# Altium footprint library Footprint.PcbLib: 154 footprints (part 5 of 10)
Each footprint in its own frame and in the unit in brackets; x right, y up, seen from the top. Pads: shape width x height; smd on the part's side, far side on the other; paste and mask are expansions set on the pad; w line width, h text height; cw(c..) or ccw(c..) is an arc to the next point about the centre after c.
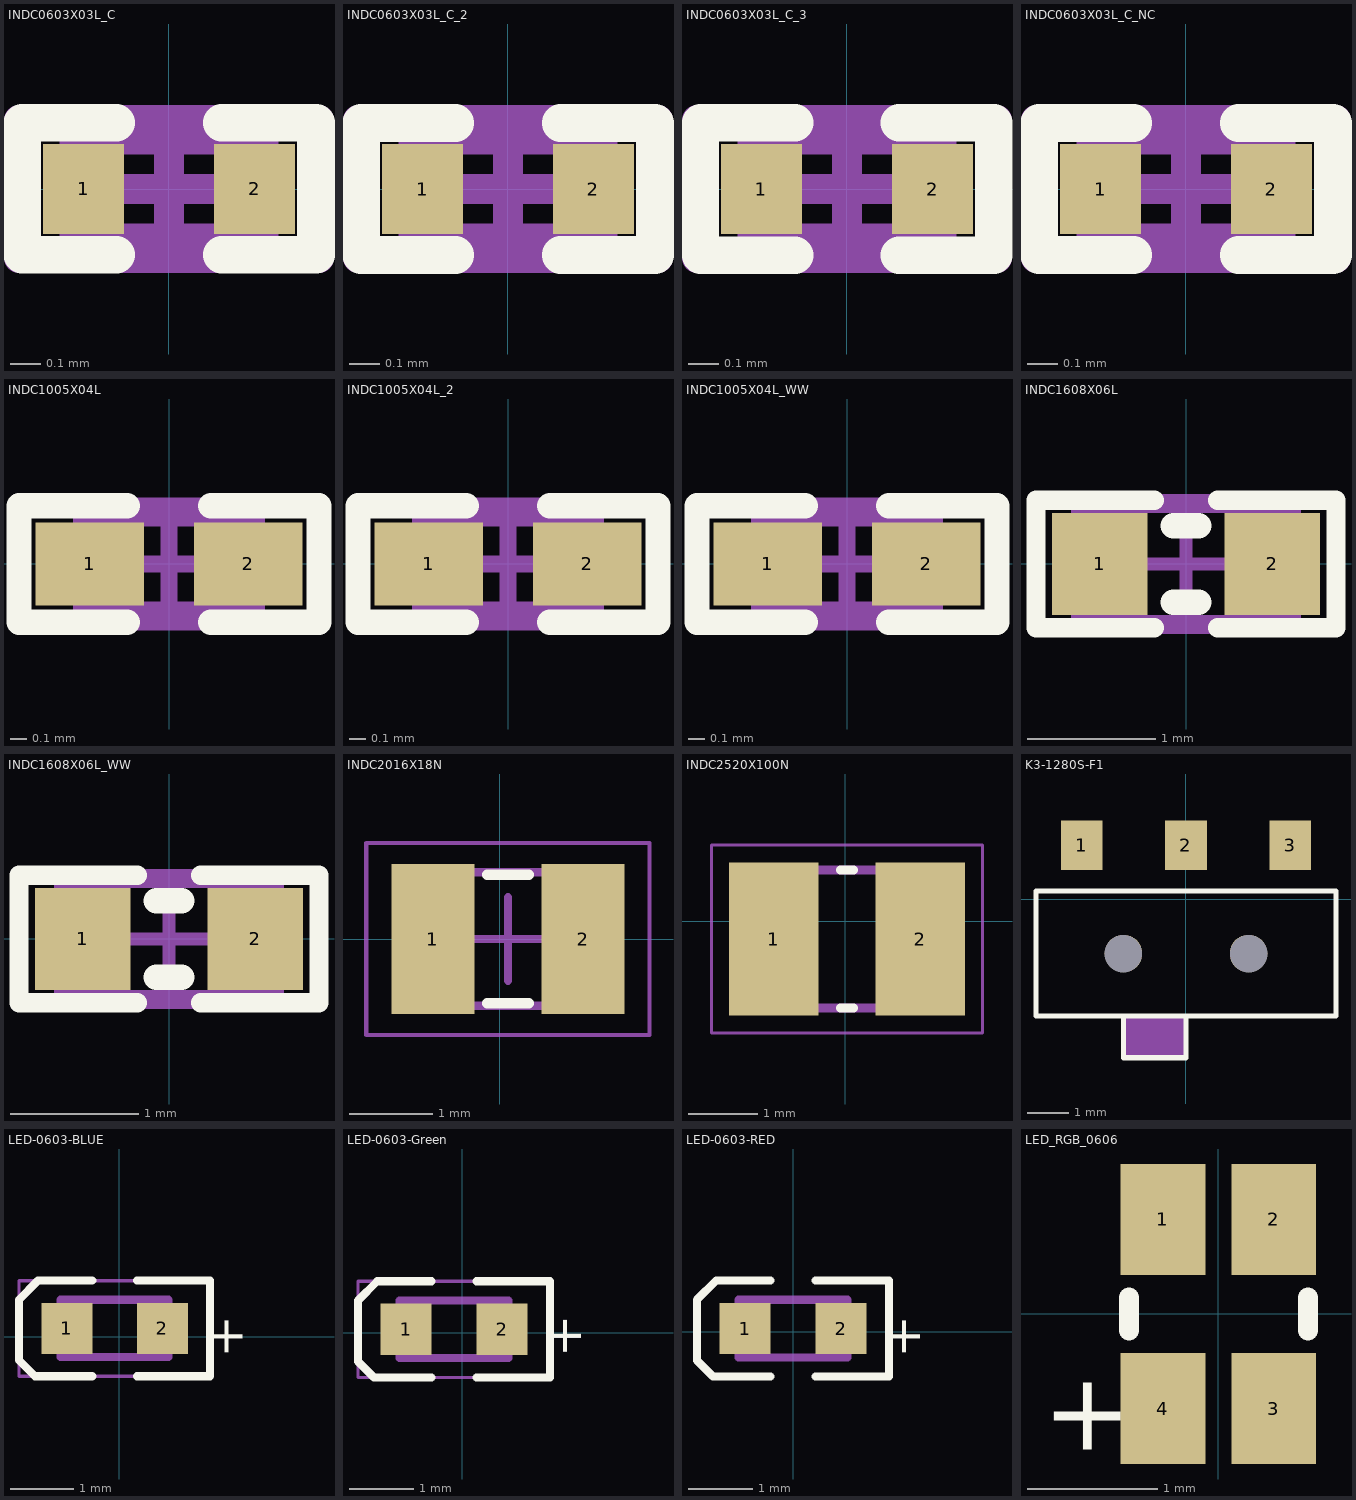
[diagram p4: the footprints below, top view; thin cyan lines are the x and y axes]

## INDC0603X03L_C [mm]
pads (2):
  rect 0.27x0.3 smd: 1(-0.285,0) 2(0.285,0)
Top Overlay:
  lines w0.125: -0.175,-0.22 -0.49,-0.22 -0.49,0.22 -0.175,0.22 ; 0.175,-0.22 0.49,-0.22 0.49,0.22 0.175,0.22
Mechanical 7:
  lines w0.1: -0.315,-0.165 -0.315,0.165 0.315,0.165 0.315,-0.165 -0.315,-0.165
  text ".Designator" at -0.306,0.268 h0.3
Mechanical 15:
  lines w0.1: -0.165,0 0.165,0 ; 0,-0.165 0,0.165 ; -0.5,-0.23 -0.5,0.23 0.5,0.23 0.5,-0.23 -0.5,-0.23
3D body "User Library-smt_inductor-0201.step": height 0.26, standoff -0.01, extent -0.31,-0.16 0.31,0.16

## INDC0603X03L_C_2 [mm]
pads (2):
  rect 0.27x0.3 smd: 1(-0.285,0) 2(0.285,0)
Top Overlay:
  lines w0.125: -0.175,-0.22 -0.49,-0.22 -0.49,0.22 -0.175,0.22 ; 0.175,-0.22 0.49,-0.22 0.49,0.22 0.175,0.22
Mechanical 7:
  lines w0.1: -0.315,-0.165 -0.315,0.165 0.315,0.165 0.315,-0.165 -0.315,-0.165
  text ".Designator" at -0.306,0.268 h0.3
Mechanical 15:
  lines w0.1: -0.165,0 0.165,0 ; 0,-0.165 0,0.165 ; -0.5,-0.23 -0.5,0.23 0.5,0.23 0.5,-0.23 -0.5,-0.23
3D body "User Library-smt_inductor-0201.step": height 0.26, standoff -0.01, extent -0.31,-0.16 0.31,0.16

## INDC0603X03L_C_3 [mm]
pads (2):
  rect 0.27x0.3 smd: 1(-0.285,0) 2(0.285,0)
Top Overlay:
  lines w0.125: -0.175,-0.22 -0.49,-0.22 -0.49,0.22 -0.175,0.22 ; 0.175,-0.22 0.49,-0.22 0.49,0.22 0.175,0.22
Mechanical 7:
  lines w0.1: -0.315,-0.165 -0.315,0.165 0.315,0.165 0.315,-0.165 -0.315,-0.165
  text ".Designator" at -0.306,0.268 h0.3
Mechanical 15:
  lines w0.1: -0.165,0 0.165,0 ; 0,-0.165 0,0.165 ; -0.5,-0.23 -0.5,0.23 0.5,0.23 0.5,-0.23 -0.5,-0.23
3D body "User Library-smt_inductor-0201.step": height 0.26, standoff -0.01, extent -0.31,-0.16 0.31,0.16

## INDC0603X03L_C_NC [mm]
pads (2):
  rect 0.27x0.3 smd: 1(-0.285,0) 2(0.285,0)
Top Overlay:
  lines w0.125: -0.175,-0.22 -0.49,-0.22 -0.49,0.22 -0.175,0.22 ; 0.175,-0.22 0.49,-0.22 0.49,0.22 0.175,0.22
Mechanical 7:
  lines w0.1: -0.315,-0.165 -0.315,0.165 0.315,0.165 0.315,-0.165 -0.315,-0.165
  text ".Designator" at -0.306,0.268 h0.3
Mechanical 15:
  lines w0.1: -0.165,0 0.165,0 ; 0,-0.165 0,0.165 ; -0.5,-0.23 -0.5,0.23 0.5,0.23 0.5,-0.23 -0.5,-0.23

## INDC1005X04L [mm]
pads (2):
  rect 0.65x0.5 smd: 1(-0.475,0) 2(0.475,0)
Top Overlay:
  lines w0.152: -0.25,-0.35 -0.9,-0.35 -0.9,0.35 -0.25,0.35 ; 0.25,-0.35 0.9,-0.35 0.9,0.35 0.25,0.35
Mechanical 7:
  lines w0.1: -0.525,-0.275 0.525,-0.275 0.525,0.275 -0.525,0.275 -0.525,-0.275
  text ".Designator" at -0.432,-0.152 h0.3
Mechanical 15:
  lines w0.1: -0.275,0 0.275,0 ; 0,-0.275 0,0.275 ; -0.9,-0.35 0.9,-0.35 0.9,0.35 -0.9,0.35 -0.9,-0.35
3D body "User Library-Chip Inductor 0402.step": height 0.5, standoff 0, extent -0.5,-0.3 0.5,0.3

## INDC1005X04L_2 [mm]
pads (2):
  rect 0.65x0.5 smd: 1(-0.475,0) 2(0.475,0)
Top Overlay:
  lines w0.152: -0.25,-0.35 -0.9,-0.35 -0.9,0.35 -0.25,0.35 ; 0.25,-0.35 0.9,-0.35 0.9,0.35 0.25,0.35
Mechanical 7:
  lines w0.1: -0.525,-0.275 -0.525,0.275 0.525,0.275 0.525,-0.275 -0.525,-0.275
  text ".Designator" at -0.432,-0.152 h0.3
Mechanical 15:
  lines w0.1: -0.275,0 0.275,0 ; 0,-0.275 0,0.275 ; -0.9,-0.35 -0.9,0.35 0.9,0.35 0.9,-0.35 -0.9,-0.35
3D body "User Library-Chip Inductor 0402.step": height 0.5, standoff 0, extent -0.5,-0.3 0.5,0.3

## INDC1005X04L_WW [mm]
pads (2):
  rect 0.65x0.5 smd: 1(-0.475,0) 2(0.475,0)
Top Overlay:
  lines w0.152: -0.25,-0.35 -0.9,-0.35 -0.9,0.35 -0.25,0.35 ; 0.25,-0.35 0.9,-0.35 0.9,0.35 0.25,0.35
Mechanical 7:
  lines w0.1: -0.525,-0.275 -0.525,0.275 0.525,0.275 0.525,-0.275 -0.525,-0.275
  text ".Designator" at -0.432,-0.152 h0.3
Mechanical 15:
  lines w0.1: -0.275,0 0.275,0 ; 0,-0.275 0,0.275 ; -0.9,-0.35 -0.9,0.35 0.9,0.35 0.9,-0.35 -0.9,-0.35
3D body "User Library-INDC1005X50-MURATA_LQW15A.STEP": height 0.51, standoff 0, extent -0.5,-0.3 0.5,0.3

## INDC1608X06L [mm]
pads (2):
  rect 0.75x0.8 smd: 1(-0.675,0) 2(0.675,0)
Top Overlay:
  lines w0.152: -0.25,-0.5 -1.175,-0.5 -1.175,0.5 -0.25,0.5 ; 0.25,-0.5 1.175,-0.5 1.175,0.5 0.25,0.5
  lines w0.2: -0.1,-0.3 0.1,-0.3 ; -0.1,0.3 0.1,0.3
Mechanical 7:
  lines w0.1: -0.85,-0.45 0.85,-0.45 0.85,0.45 -0.85,0.45 -0.85,-0.45
  text ".Designator" at -0.7,-0.2 h0.38
Mechanical 15:
  lines w0.1: -0.45,0 0.45,0 ; 0,-0.45 0,0.45 ; -1.175,-0.5 -1.175,0.5 1.175,0.5 1.175,-0.5 -1.175,-0.5
3D body "User Library-Chip Inductor.step": height 0.8, standoff 0, extent -0.8,-0.475 0.8,0.475

## INDC1608X06L_WW [mm]
pads (2):
  rect 0.75x0.8 smd: 1(-0.675,0) 2(0.675,0)
Top Overlay:
  lines w0.152: -0.25,-0.5 -1.175,-0.5 -1.175,0.5 -0.25,0.5 ; 0.25,-0.5 1.175,-0.5 1.175,0.5 0.25,0.5
  lines w0.2: -0.1,-0.3 0.1,-0.3 ; -0.1,0.3 0.1,0.3
Mechanical 7:
  lines w0.1: -0.85,-0.45 0.85,-0.45 0.85,0.45 -0.85,0.45 -0.85,-0.45
  text ".Designator" at -0.711,-0.152 h0.3
Mechanical 15:
  lines w0.1: -0.45,0 0.45,0 ; 0,-0.45 0,0.45 ; -1.175,-0.5 -1.175,0.5 1.175,0.5 1.175,-0.5 -1.175,-0.5
3D body "User Library-INDC1608X80-MURATA_LQW18A.step": height 0.81, standoff 0, extent -0.8,-0.45 0.8,0.45

## INDC2016X18N [mm]
pads (2):
  rect 1x1.8 smd: 1(-0.8,0) 2(1,0)
Top Overlay:
  lines w0.125: -0.15,-0.77 0.35,-0.77 ; -0.15,0.77 0.35,0.77
Mechanical 7:
  lines w0.1: -0.9,-0.8 1.1,-0.8 1.1,0.8 -0.9,0.8 -0.9,-0.8
  text ".Designator" at -0.425,-0.175 h0.38
Mechanical 15:
  lines w0.05: -1.6,-1.15 -1.6,1.15 1.8,1.15 1.8,-1.15 -1.6,-1.15
  lines w0.1: -0.4,0 0.6,0 ; 0.1,-0.5 0.1,0.5
3D body "INDC2016X10N.step": height 1, standoff 0, extent -0.9,-0.8 1.1,0.8

## INDC2520X100N [mm]
pads (2):
  rect 1.3x2.22 smd: 1(-1.035,-0.254) 2(1.085,-0.254)
Top Overlay:
  lines w0.127: -0.071,-1.254 0.122,-1.254 ; -0.071,0.746 0.122,0.746
Top Assembly:
  lines w0.05: -1.935,-1.614 1.985,-1.614 1.985,1.106 -1.935,1.106 -1.935,-1.614
Top Component Outline:
  lines w0.127: -1.225,-1.254 1.275,-1.254 1.275,0.746 -1.225,0.746 -1.225,-1.254
3D body "INDC2520X10N.step": height 1, standoff 0, extent -1.225,-1.254 1.275,0.746

## K3-1280S-F1 [mm]
pads (5):
  rect 1x1.2 smd paste+0 mask+0.05: 1(-2.5,1.3) 2(0,1.3) 3(2.5,1.3)
  round 0.9 hole 0.9 unplated paste-2539.97: ""(-1.5,-1.3) ""(1.5,-1.3)
Top Overlay:
  lines w0.127: -1.5,-2.8 0,-2.8 ; -1.5,-2.8 -3.6,-2.8 -3.6,0.2 3.6,0.2 3.6,-2.8 0,-2.8 ; -1.5,-2.8 -1.5,-3.8 0,-3.8 0,-2.8
Mechanical 15:
  circle w0.4: c1.5,-1.3 r0.2
  circle w0.4: c-1.5,-1.3 r0.2
  region: -1.5,-2.8 -1.5,-3.8 0,-3.8 0,-2.8

## LED-0603-BLUE [mm]
pads (2):
  rect 0.8x0.8 smd: 1(-0.826,0.127) 2(0.674,0.127)
Top Overlay:
  lines w0.127: -0.426,-0.623 -1.326,-0.623 -1.576,-0.373 -1.576,0.577 -1.276,0.877 -0.426,0.877 ; 0.274,-0.623 1.424,-0.623 1.424,0.877 0.274,0.877
  text "+" at 2.134,0.33 h1
Top Assembly:
  lines w0.05: -1.576,-0.623 -1.576,0.877 1.424,0.877 1.424,-0.623 -1.576,-0.623
Top Component Outline:
  lines w0.127: -0.926,-0.323 -0.926,0.577 0.774,0.577 0.774,-0.323 -0.926,-0.323
3D body "LED_0603_B.STEP": height 0.6, standoff 0, extent -0.876,-0.273 0.724,0.527

## LED-0603-Green [mm]
pads (2):
  rect 0.8x0.8 smd: 1(-0.877,0.051) 2(0.623,0.051)
Top Overlay:
  lines w0.127: -0.477,-0.699 -1.377,-0.699 -1.627,-0.449 -1.627,0.501 -1.327,0.801 -0.477,0.801 ; 0.223,-0.699 1.373,-0.699 1.373,0.801 0.223,0.801
  text "+" at 2.057,0.279 h1
Top Assembly:
  lines w0.05: -1.627,-0.699 -1.627,0.801 1.373,0.801 1.373,-0.699 -1.627,-0.699
Top Component Outline:
  lines w0.127: -0.977,-0.399 -0.977,0.501 0.723,0.501 0.723,-0.399 -0.977,-0.399
3D body "LTST-C190GKT.STEP": height 0.9, standoff 0, extent -0.977,-0.399 0.723,0.501

## LED-0603-RED [mm]
pads (2):
  rect 0.8x0.8 smd: 1(-0.75,0.051) 2(0.75,0.051)
Top Overlay:
  lines w0.127: -0.35,-0.699 -1.25,-0.699 -1.5,-0.449 -1.5,0.501 -1.2,0.801 -0.35,0.801 ; 0.35,-0.699 1.5,-0.699 1.5,0.801 0.35,0.801
  text "+" at 2.184,0.254 h1
Top Assembly:
  lines w0.05: 1.5,-0.699 1.5,0.801
Top Component Outline:
  lines w0.127: -0.85,-0.399 0.85,-0.399 0.85,0.501 -0.85,0.501 -0.85,-0.399
3D body "LED_0603_R.STEP": height 0.6, standoff 0, extent -0.8,-0.349 0.8,0.451

## LED_RGB_0606 [mm]
pads (4):
  rect 0.65x0.85 smd paste+0 mask+0.01: 1(-0.425,0.725) 2(0.425,0.725) 3(0.425,-0.725) 4(-0.425,-0.725)
Top Overlay:
  lines w0.152: -0.686,-0.127 -0.686,0.127 ; 0.686,-0.127 0.686,0.127
  text "+" at -1.346,-1.041 h0.6
3D body: height 0.18, standoff 0, extent -0.75,-0.8 0.75,0.8
3D body: height 0.35, standoff 0.18, extent -0.75,-0.55 0.75,0.55
3D body: height 0.27, standoff 0.18, extent -0.35,-0.15 -0.05,0.15
3D body: height 0.27, standoff 0.18, extent 0.05,0.05 0.35,0.35
3D body: height 0.27, standoff 0.18, extent 0.05,-0.35 0.35,-0.05